# Altium schematic symbol library MAX3051EKA+T.SchLib: 1 symbol
Pins are listed as number, name and electrical type; pins without a type are passive.

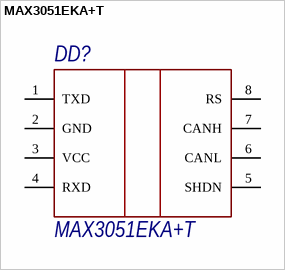
[diagram p0: symbol MAX3051EKA+T]

## MAX3051EKA+T
designator DD?
CAN трансивер 1Mbps +3.3В
pins: 1 TXD, 2 GND, 3 VCC, 4 RXD, 5 SHDN, 6 CANL, 7 CANH, 8 RS